# Altium footprint library zulu_a7.PcbLib: 33 footprints (part 3 of 3)
Each footprint in its own frame and in the unit in brackets; x right, y up, seen from the top. Pads: shape width x height; smd on the part's side, far side on the other; paste and mask are expansions set on the pad; w line width, h text height; cw(c..) or ccw(c..) is an arc to the next point about the centre after c.
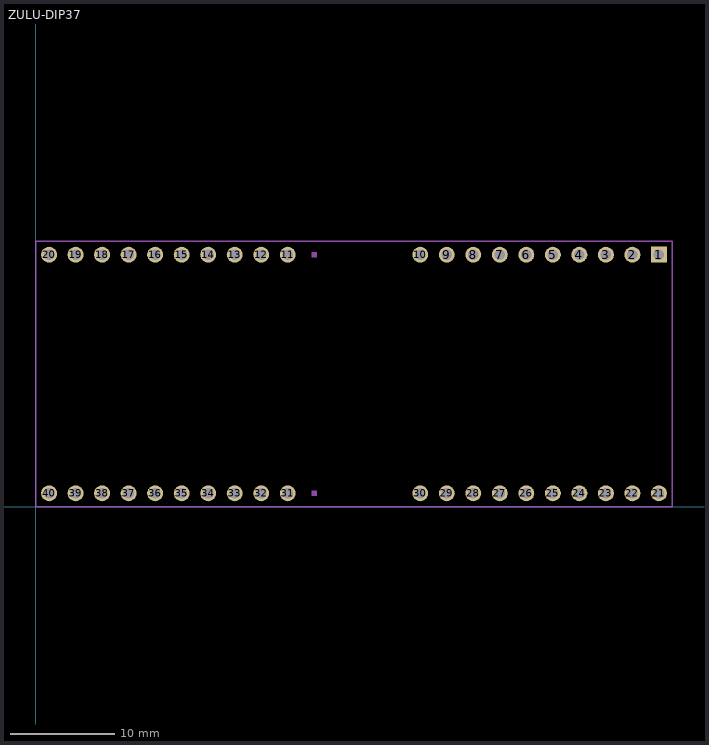
[diagram p2: the footprint, top view; thin cyan lines are the x and y axes]

## ZULU-DIP37 [mil] "ZULU-DIP37"
pads (40):
  rect 60x60 / inner round 55.43 / far side rect 60x60 hole 40: 1(2350,950)
  round 60 hole 40: 2(2250,950) 3(2150,950) 4(2050,950) 5(1950,950) 6(1850,950) 7(1750,950) 8(1650,950) 9(1550,950) 10(1450,950) 11(950,950) 12(850,950) 13(750,950) 14(650,950) 15(550,950) 16(450,950) 17(350,950) 18(250,950) 19(150,950) 20(50,950) 21(2350,50) 22(2250,50) 23(2150,50) 24(2050,50) 25(1950,50) 26(1850,50) 27(1750,50) 28(1650,50) 29(1550,50) 30(1450,50) 31(950,50) 32(850,50) 33(750,50) 34(650,50) 35(550,50) 36(450,50) 37(350,50) 38(250,50) 39(150,50) 40(50,50)
Mechanical 3:
  drawing of 40 lines, arcs and shapes, not listed
Mechanical 7:
  lines w6: 0,0 0,1000 2400,1000 2400,0 0,0
3D body: height 106.3, standoff 0, extent 1400,900 2400,1000
3D body: height 106.3, standoff 0, extent 0,900 1000,1000
3D body: height 106.3, standoff 0, extent 1400,0 2400,100
3D body: height 106.3, standoff 0, extent 0,0 1000,100